# Altium footprint library CoilcraftPCB.PcbLib: 320 footprints (part 2 of 20)
Each footprint in its own frame and in the unit in brackets; x right, y up, seen from the top. Pads: shape width x height; smd on the part's side, far side on the other; paste and mask are expansions set on the pad; w line width, h text height; cw(c..) or ccw(c..) is an arc to the next point about the centre after c.
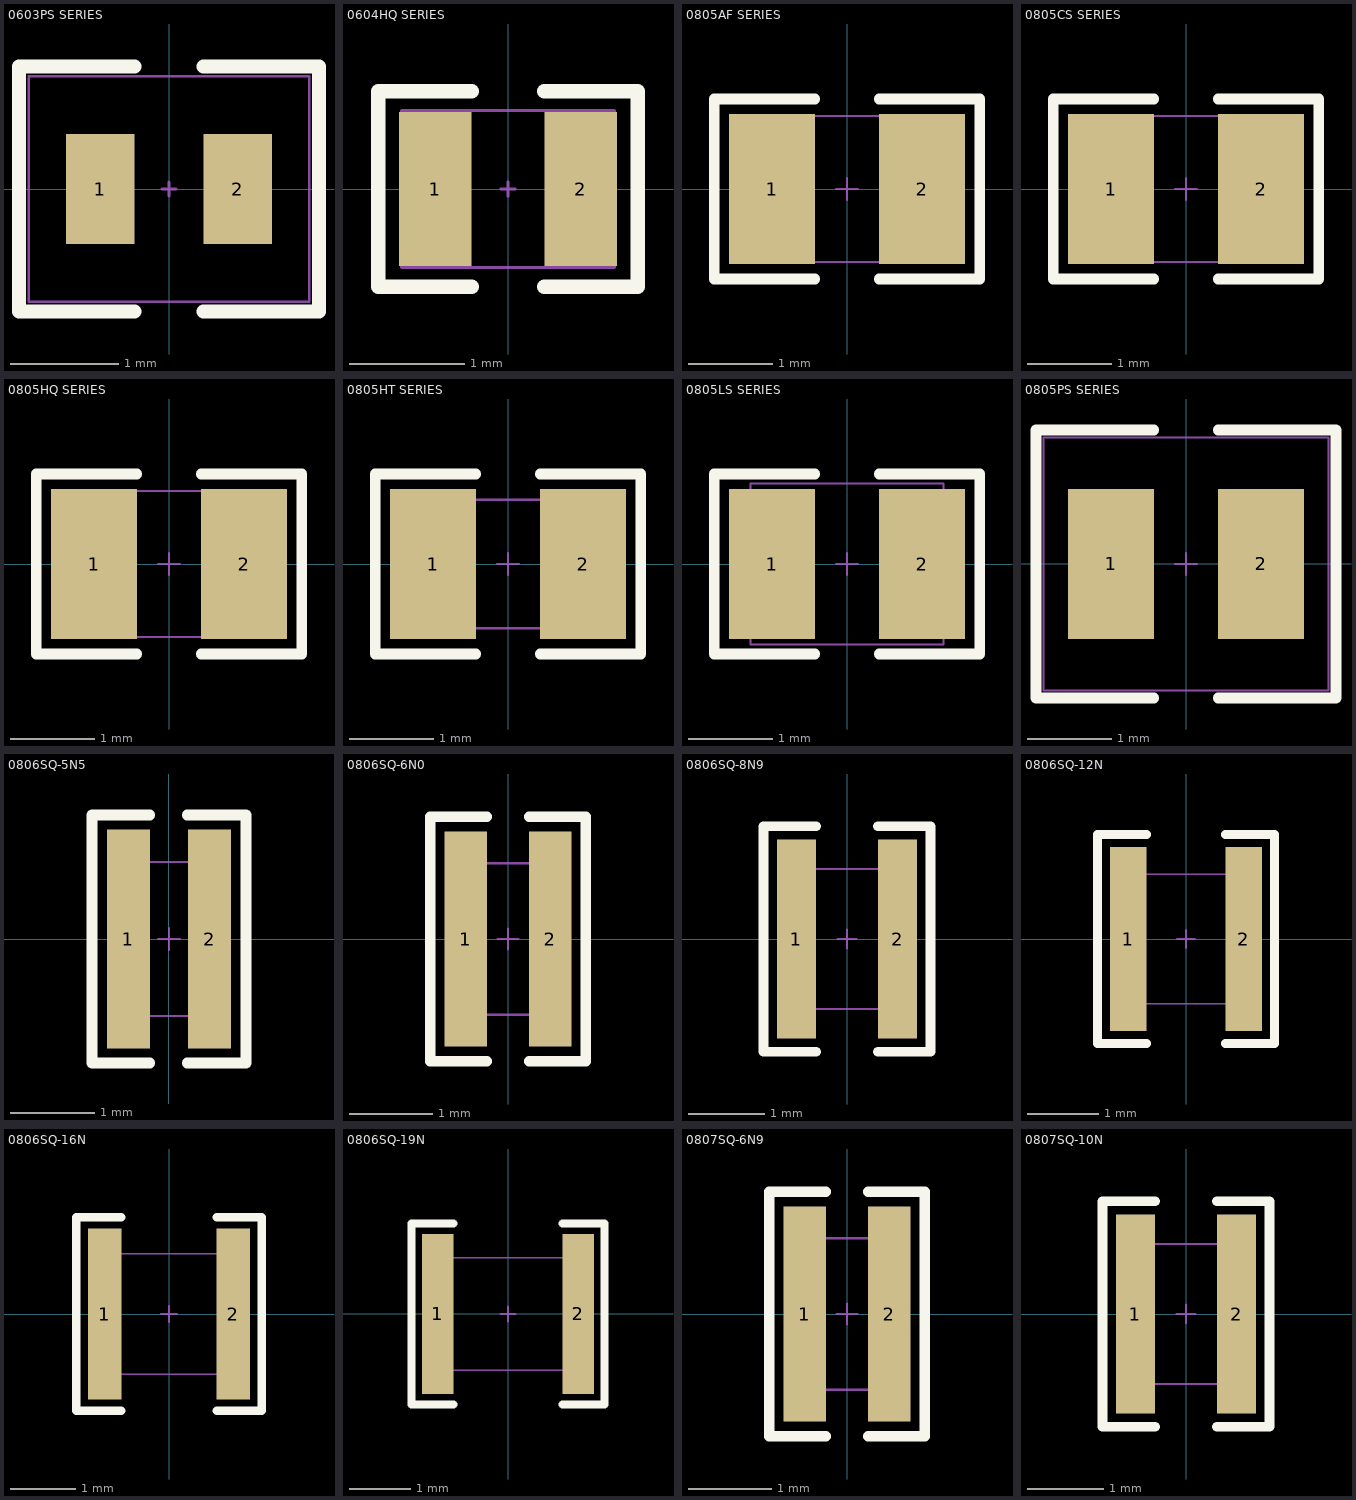
[diagram p1: the footprints below, top view; thin cyan lines are the x and y axes]

## 0603PS SERIES [mil] "Coilcraft Chip Inductor"
height 71
pads (2):
  rect 25x40 smd: 1(-25,0) 2(25,0)
Top Overlay:
  lines w5: -12.5,-44.5 -54.5,-44.5 -54.5,44.5 -12.5,44.5 ; 12.5,-44.5 54.5,-44.5 54.5,44.5 12.5,44.5
Mechanical 13:
  lines w1: -2.5,0 2.5,0 ; 0,-2.5 0,2.5
Mechanical 14:
  lines w1: -51,-41 -51,41 51,41 51,-41 -51,-41
3D body: height 70.47, standoff -0.39, extent -51.56,-41 51.56,41

## 0604HQ SERIES [mil] "Coilcraft Chip Inductor"
height 47
pads (2):
  rect 25x53 smd: 1(-25,0) 2(25,0)
Top Overlay:
  lines w5: -12.5,-33.5 -44.5,-33.5 -44.5,33.5 -12.5,33.5 ; 12.5,-33.5 44.5,-33.5 44.5,33.5 12.5,33.5
Mechanical 13:
  lines w1: -2.5,0 2.5,0 ; 0,-2.5 0,2.5
Mechanical 14:
  lines w1: -36.5,-27 -36.5,27 36.5,27 36.5,-27 -36.5,-27
3D body: height 46.46, standoff -0.39, extent -36.42,-26.97 36.41,26.97

## 0805AF SERIES [mil] "Coilcraft Chip Inductor"
height 60
pads (2):
  rect 40x70 smd: 1(-35,0) 2(35,0)
Top Overlay:
  lines w5: -15,-42 -62,-42 -62,42 -15,42 ; 15,-42 62,-42 62,42 15,42
Mechanical 13:
  lines w1: -5,0 5,0 ; 0,-5 0,5
Mechanical 14:
  lines w1: -45,-34 -45,34 45,34 45,-34 -45,-34
3D body: height 59.45, standoff -0.39, extent -45.08,-34.05 45.08,34.06

## 0805CS SERIES [mil] "Coilcraft Chip Inductor"
height 60
pads (2):
  rect 40x70 smd: 1(-35,0) 2(35,0)
Top Overlay:
  lines w5: -15,-42 -62,-42 -62,42 -15,42 ; 15,-42 62,-42 62,42 15,42
Mechanical 13:
  lines w1: -5,0 5,0 ; 0,-5 0,5
Mechanical 14:
  lines w1: -45,-34 -45,34 45,34 45,-34 -45,-34
3D body: height 59.45, standoff -0.39, extent -45.06,-33.95 45.06,33.96

## 0805HQ SERIES [mil] "Coilcraft Chip Inductor"
height 60
pads (2):
  rect 40x70 smd: 1(-35,0) 2(35,0)
Top Overlay:
  lines w5: -15,-42 -62,-42 -62,42 -15,42 ; 15,-42 62,-42 62,42 15,42
Mechanical 13:
  lines w1: -5,0 5,0 ; 0,-5 0,5
Mechanical 14:
  lines w1: -45,-34 -45,34 45,34 45,-34 -45,-34
3D body: height 59.45, standoff -0.39, extent -45.06,-33.95 45.06,33.96

## 0805HT SERIES [mil] "Coilcraft Chip Inductor"
height 35
pads (2):
  rect 40x70 smd: 1(-35,0) 2(35,0)
Top Overlay:
  lines w5: -15,-42 -62,-42 -62,42 -15,42 ; 15,-42 62,-42 62,42 15,42
Mechanical 13:
  lines w1: -5,0 5,0 ; 0,-5 0,5
Mechanical 14:
  lines w1: -42.5,-30 42.5,-30 42.5,30 -42.5,30 -42.5,-30
3D body: height 34.73, standoff -0.39, extent -41.34,-30.98 41.33,30.99

## 0805LS SERIES [mil] "Coilcraft Chip Inductor"
height 63
pads (2):
  rect 40x70 smd: 1(-35,0) 2(35,0)
Top Overlay:
  lines w5: -15,-42 -62,-42 -62,42 -15,42 ; 15,-42 62,-42 62,42 15,42
Mechanical 13:
  lines w1: -5,0 5,0 ; 0,-5 0,5
Mechanical 14:
  lines w1: -45,-37.5 45,-37.5 45,37.5 -45,37.5 -45,-37.5
3D body: height 62.6, standoff -0.39, extent -45.08,-37.59 45.08,37.6

## 0805PS SERIES [mil] "Coilcraft Chip Inductor"
height 79
pads (2):
  rect 40x70 smd: 1(-35,0) 2(35,0)
Top Overlay:
  lines w5: -15,-62.5 -70,-62.5 -70,62.5 -15,62.5 ; 15,-62.5 70,-62.5 70,62.5 15,62.5
Mechanical 13:
  lines w1: -5,0 5,0 ; 0,-5 0,5
Mechanical 14:
  lines w1: -66.5,-59 66.5,-59 66.5,59 -66.5,59 -66.5,-59
3D body: height 78.74, standoff -0.39, extent -66.54,-59.05 66.53,59.06

## 0806SQ-5N5 [mm] "Coilcraft Square Air Coil Inductor"
height 1.5
pads (2):
  rect 0.51x2.6 smd: 1(-0.481,0) 2(0.481,0)
Top Overlay:
  lines w0.127: -0.229,-1.473 -0.914,-1.473 -0.914,1.473 -0.229,1.473 ; 0.216,-1.473 0.914,-1.473 0.914,1.473 0.216,1.473
Mechanical 13:
  lines w0.025: -0.127,0 0.127,0 ; 0,-0.127 0,0.127
Mechanical 14:
  lines w0.025: -0.673,-0.914 0.673,-0.914 0.673,0.914 -0.673,0.914 -0.673,-0.914
3D body: height 1.5, standoff 0, extent -0.724,-1.041 0.724,1.041

## 0806SQ-6N0 [mm] "Coilcraft Square Air Coil Inductor"
height 1.397
pads (2):
  rect 0.51x2.6 smd: 1(-0.51,0) 2(0.51,0)
Top Overlay:
  lines w0.127: -0.254,-1.473 -0.94,-1.473 -0.94,1.473 -0.254,1.473 ; 0.254,-1.473 0.94,-1.473 0.94,1.473 0.254,1.473
Mechanical 13:
  lines w0.025: -0.127,0 0.127,0 ; 0,-0.127 0,0.127
Mechanical 14:
  lines w0.025: 0.647,-0.914 -0.647,-0.914 -0.647,0.914 0.647,0.914 0.647,-0.914
3D body: height 1.5, standoff 0, extent -0.696,-1.05 0.696,1.054

## 0806SQ-8N9 [mm] "Coilcraft Square Air Coil Inductor"
height 1.397
pads (2):
  rect 0.51x2.6 smd: 1(-0.66,0) 2(0.66,0)
Top Overlay:
  lines w0.127: -0.406,-1.473 -1.092,-1.473 -1.092,1.473 -0.406,1.473 ; 0.406,-1.473 1.092,-1.473 1.092,1.473 0.406,1.473
Mechanical 13:
  lines w0.025: -0.127,0 0.127,0 ; 0,-0.127 0,0.127
Mechanical 14:
  lines w0.025: -0.813,-0.914 -0.813,0.914 0.813,0.914 0.813,-0.914 -0.813,-0.914
3D body: height 1.5, standoff 0, extent -0.889,-1.065 0.889,1.041

## 0806SQ-12N [mm] "Coilcraft Square Air Coil Inductor"
height 1.397
pads (2):
  rect 0.51x2.6 smd: 1(-0.815,0) 2(0.815,0)
Top Overlay:
  lines w0.127: -0.559,-1.473 -1.245,-1.473 -1.245,1.473 -0.559,1.473 ; 0.559,-1.473 1.245,-1.473 1.245,1.473 0.559,1.473
Mechanical 13:
  lines w0.025: -0.127,0 0.127,0 ; 0,-0.127 0,0.127
Mechanical 14:
  lines w0.025: -0.965,-0.914 -0.965,0.914 0.965,0.914 0.965,-0.914 -0.965,-0.914
3D body: height 1.5, standoff 0.01, extent -1.041,-1.056 1.041,1.041

## 0806SQ-16N [mm] "Coilcraft Square Air Coil Inductor"
height 1.397
pads (2):
  rect 0.51x2.6 smd: 1(-0.98,0) 2(0.98,0)
Top Overlay:
  lines w0.127: -0.724,-1.473 -1.41,-1.473 -1.41,1.473 -0.724,1.473 ; 0.724,-1.473 1.41,-1.473 1.41,1.473 0.724,1.473
Mechanical 13:
  lines w0.025: -0.127,0 0.127,0 ; 0,-0.127 0,0.127
Mechanical 14:
  lines w0.025: -1.143,-0.914 -1.143,0.914 1.143,0.914 1.143,-0.914 -1.143,-0.914
3D body: height 1.5, standoff 0, extent -1.219,-1.057 1.219,1.041

## 0806SQ-19N [mm] "Coilcraft Square Air Coil Inductor"
height 1.397
pads (2):
  rect 0.51x2.6 smd: 1(-1.145,0) 2(1.145,0)
Top Overlay:
  lines w0.127: -0.889,-1.473 -1.575,-1.473 -1.575,1.473 -0.889,1.473 ; 0.889,-1.473 1.575,-1.473 1.575,1.473 0.889,1.473
Mechanical 13:
  lines w0.025: -0.127,0 0.127,0 ; 0,-0.127 0,0.127
Mechanical 14:
  lines w0.025: -1.295,-0.914 1.295,-0.914 1.295,0.914 -1.295,0.914 -1.295,-0.914
3D body: height 1.51, standoff 0.01, extent -1.371,-1.065 1.371,1.029

## 0807SQ-6N9 [mm] "Coilcraft Square Air Coil Inductor"
height 1.524
pads (2):
  rect 0.51x2.6 smd: 1(-0.51,0) 2(0.51,0)
Top Overlay:
  lines w0.127: -0.254,-1.473 -0.94,-1.473 -0.94,1.473 -0.254,1.473 ; 0.254,-1.473 0.94,-1.473 0.94,1.473 0.254,1.473
Mechanical 13:
  lines w0.025: -0.127,0 0.127,0 ; 0,-0.127 0,0.127
Mechanical 14:
  lines w0.025: 0.647,-0.914 -0.647,-0.914 -0.647,0.914 0.647,0.914 0.647,-0.914
3D body: height 1.78, standoff 0, extent -0.724,-1.058 0.724,1.054

## 0807SQ-10N [mm] "Coilcraft Square Air Coil Inductor"
height 1.524
pads (2):
  rect 0.51x2.6 smd: 1(-0.66,0) 2(0.66,0)
Top Overlay:
  lines w0.127: -0.406,-1.473 -1.092,-1.473 -1.092,1.473 -0.406,1.473 ; 0.406,-1.473 1.092,-1.473 1.092,1.473 0.406,1.473
Mechanical 13:
  lines w0.025: -0.127,0 0.127,0 ; 0,-0.127 0,0.127
Mechanical 14:
  lines w0.025: -0.813,-0.914 -0.813,0.914 0.813,0.914 0.813,-0.914 -0.813,-0.914
3D body: height 1.78, standoff 0, extent -0.889,-1.065 0.889,1.041